# Altium schematic symbol library 24AA02E48T-I_SN.SchLib: 1 symbol
Pins are listed as number, name and electrical type; pins without a type are passive.

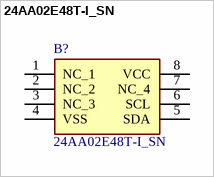
[diagram p0: symbol 24AA02E48T-I_SN]

## 24AA02E48T-I_SN
designator B?
EEPROM 2K, 256x8 1.8V Serial EE; Manufacturer_Name: Microchip; Manufacturer_Part_Number: 24AA02E48T-I/SN; Geometry.Height: 1.75mm; Mouser Part Number: 579-24AA02E48TISN; Mouser Price/Stock: https://www.mouser.co.uk/ProductDetail/Microchip-Technology/24AA02E48T-I-SN?qs=h8kCHL4kpM4sigECV15Mzw%3D%3D; Arrow Part Number: 24AA02E48T-I/SN; Arrow Price/Stock: https://www.arrow.com/en/products/24aa02e48t-isn/microchip-technology?utm_currency=USD&region=nac; Datasheet Link: http://www.microchip.com/mymicrochip/filehandler.aspx?ddocname=en538826
footprint SOIC127P600X175-8N
pins: 1 NC_1, 2 NC_2, 3 NC_3, 4 VSS, 5 SDA, 6 SCL, 7 NC_4, 8 VCC